# Altium footprint library header.PcbLib: 139 footprints (part 2 of 9)
Each footprint in its own frame and in the unit in brackets; x right, y up, seen from the top. Pads: shape width x height; smd on the part's side, far side on the other; paste and mask are expansions set on the pad; w line width, h text height; cw(c..) or ccw(c..) is an arc to the next point about the centre after c.
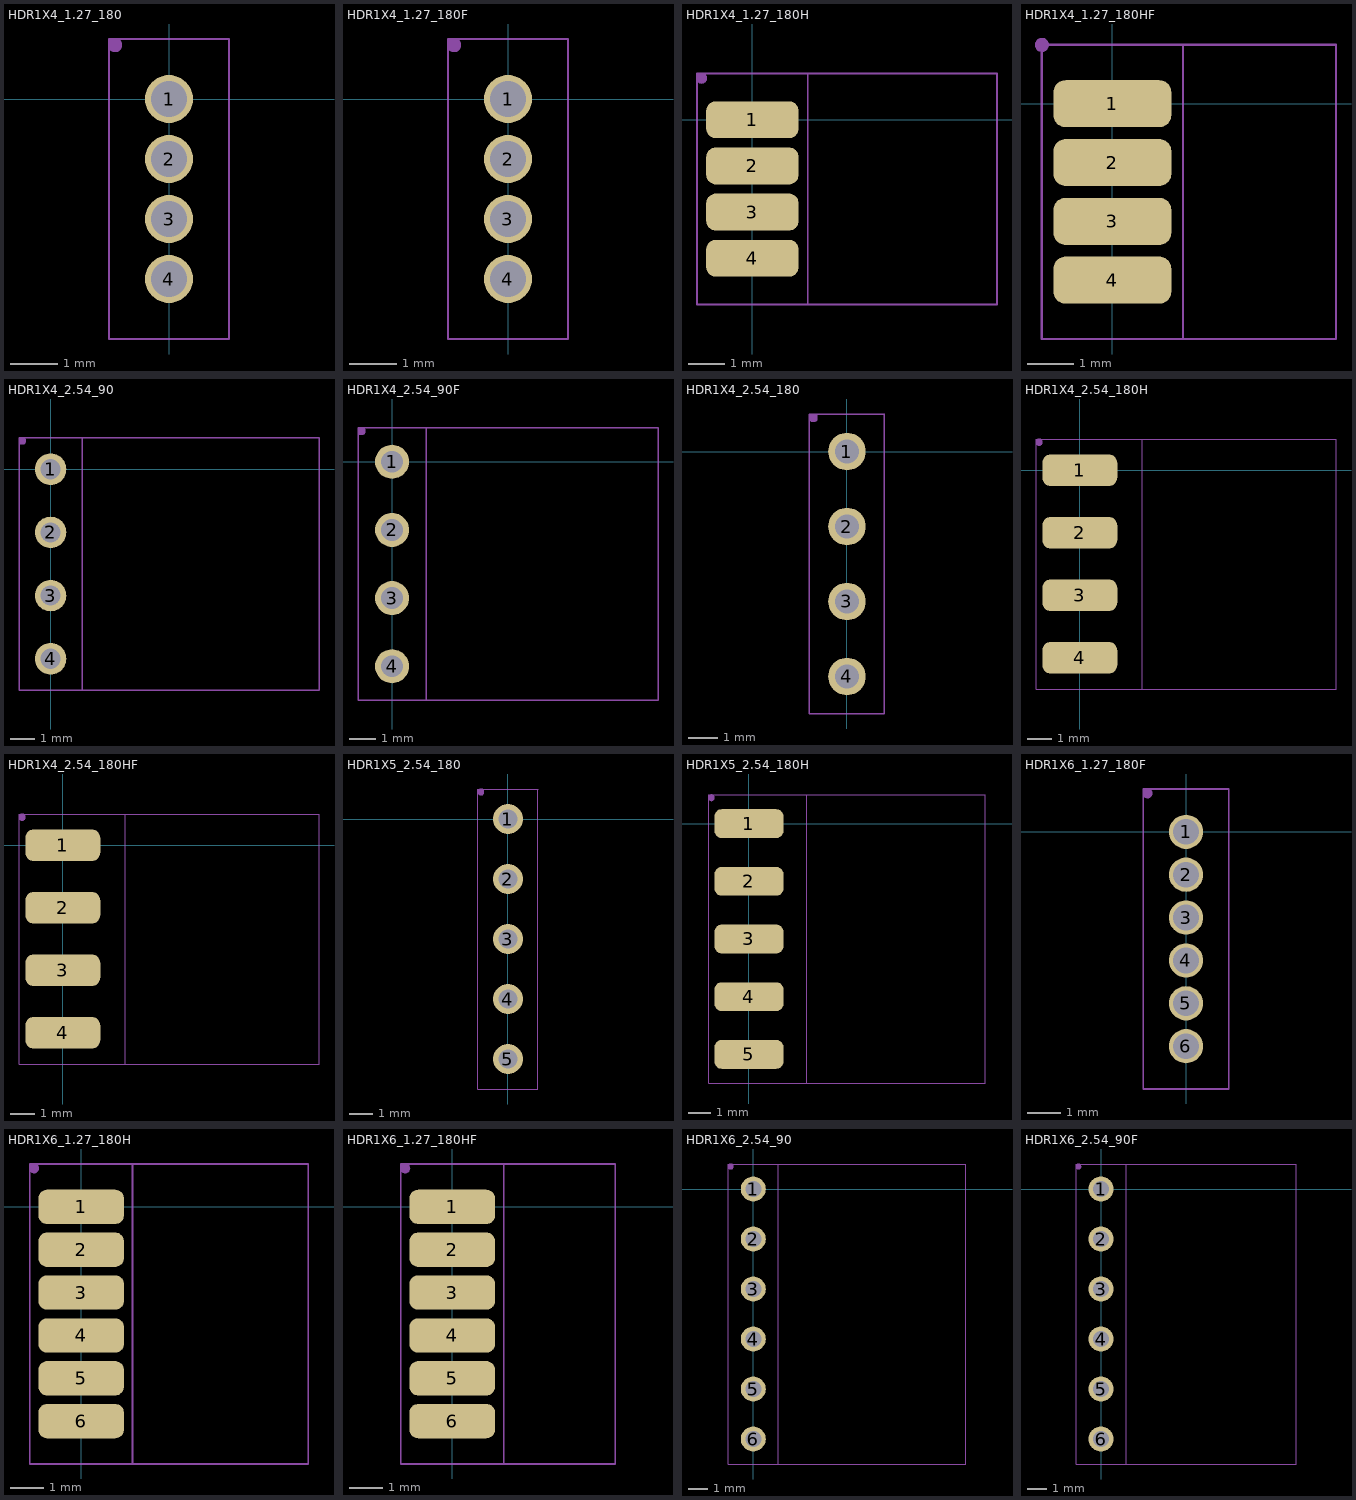
[diagram p1: the footprints below, top view; thin cyan lines are the x and y axes]

## HDR1X4_1.27_180 [mil]
height 169.29
pads (4):
  round 40 hole 30: 1(0,0) 2(0,-50) 3(0,-100) 4(0,-150)
Mechanical 13:
  lines w2: -50,-200 -50,50 50,50 50,-200 -50,-200
Top Component (Mech14):
  circle w2: c-45,45 r5
  region: -45,40 -45.99,40 -47.83,40.76 -49.24,42.17 -50,44.01 -50,45 -50,45.99 -49.24,47.83 -47.83,49.24 -45.99,50 -45,50 -44.01,50 -42.17,49.24 -40.76,47.83 -40,45.99 -40,45 -40,44.01 -40.76,42.17 -42.17,40.76 -44.01,40
  lines w2: -50,-200 -50,50 50,50 50,-200 -50,-200
  text ".Designator" at -31,-95 h80
3D body "pin_header_a-sl127-eg-g04d.stp": height 210.24, standoff -102.36, extent -49.21,-174.99 49.21,25.01

## HDR1X4_1.27_180F [mil]
height 169.29
pads (4):
  round 40 hole 30: 1(0,0) 2(0,-50) 3(0,-100) 4(0,-150)
Mechanical 13:
  lines w2: -50,-200 50,-200 50,50 -50,50 -50,-200
Top Component (Mech14):
  circle w2: c-45,45 r5
  region: -45,40 -45.99,40 -47.83,40.76 -49.24,42.17 -50,44.01 -50,45 -50,45.99 -49.24,47.83 -47.83,49.24 -45.99,50 -45,50 -44.01,50 -42.17,49.24 -40.76,47.83 -40,45.99 -40,45 -40,44.01 -40.76,42.17 -42.17,40.76 -44.01,40
  lines w2: -50,-200 50,-200 50,50 -50,50 -50,-200
  text ".Designator" at -31,-95 h80
3D body "female_header_a-bl127-eg-g04d.stp": height 133.86, standoff -94.49, extent -35.87,-182.88 35,32.88

## HDR1X4_1.27_180H [mil]
height 169.29
pads (4):
  rrect50% 100x40 smd: 1(0,0) 2(0,-50) 3(0,-100) 4(0,-150)
Mechanical 13:
  lines w2: -60,-200 -60,50 265,50 265,-200 -60,-200
Top Component (Mech14):
  circle w2: c-55,45 r5
  region: -55,40 -55.99,40 -57.83,40.76 -59.24,42.17 -60,44.01 -60,45 -60,45.99 -59.24,47.83 -57.83,49.24 -55.99,50 -55,50 -54.01,50 -52.17,49.24 -50.76,47.83 -50,45.99 -50,45 -50,44.01 -50.76,42.17 -52.17,40.76 -54.01,40
  lines w2: -60,-200 -60,50 60,50 60,-200 -60,-200
  text ".Designator" at -31,-95 h80
3D body "pin_header_a-sl127-eg-g04d.stp": height 59.21, standoff -39.21, extent -47.36,-174.99 265.24,25.01

## HDR1X4_1.27_180HF [mil]
height 169.29
pads (4):
  rrect50% 100x40 smd: 1(0,0) 2(0,-50) 3(0,-100) 4(0,-150)
Mechanical 13:
  lines w2: -60,-200 190,-200 190,50 -60,50 -60,-200
Top Component (Mech14):
  circle w2: c-60,50 r5
  region: -60,45 -60.99,45 -62.83,45.76 -64.24,47.17 -65,49.01 -65,50 -65,50.99 -64.24,52.83 -62.83,54.24 -60.99,55 -60,55 -59.01,55 -57.17,54.24 -55.76,52.83 -55,50.99 -55,50 -55,49.01 -55.76,47.17 -57.17,45.76 -59.01,45
  lines w2: -60,-200 -60,50 60,50 60,-200 -60,-200
  text ".Designator" at -31,-95 h80
3D body "female_header_a-bl127-eg-g04d.stp": height 45.43, standoff -25.43, extent -38.35,-182.88 190,32.88

## HDR1X4_2.54_90 [mil]
height 169.29
pads (4):
  round 50 hole 32: 1(0,0) 2(0,-100) 3(0,-200) 4(0,-300)
Mechanical 13:
  lines w2: -50,-350 -50,50 425,50 425,-350 -50,-350
Top Component (Mech14):
  circle w2: c-45,45 r5
  region: -45,40 -45.99,40 -47.83,40.76 -49.24,42.17 -50,44.01 -50,45 -50,45.99 -49.24,47.83 -47.83,49.24 -45.99,50 -45,50 -44.01,50 -42.17,49.24 -40.76,47.83 -40,45.99 -40,45 -40,44.01 -40.76,42.17 -42.17,40.76 -44.01,40
  lines w2: -50,-350 50,-350 50,50 -50,50 -50,-350
  text ".Designator" at -31,-170 h80
3D body "pin_header_aw140-ea-g04g.stp": height 99.21, standoff -93.7, extent -14.96,-346.06 423.62,46.07

## HDR1X4_2.54_90F [mil]
height 169.29
pads (4):
  round 50 hole 32: 1(0,0) 2(0,-100) 3(0,-200) 4(0,-300)
Mechanical 13:
  lines w2: -50,-350 390,-350 390,50 -50,50 -50,-350
Top Component (Mech14):
  circle w2: c-45,45 r5
  region: -45,40 -45.99,40 -47.83,40.76 -49.24,42.17 -50,44.01 -50,45 -50,45.99 -49.24,47.83 -47.83,49.24 -45.99,50 -45,50 -44.01,50 -42.17,49.24 -40.76,47.83 -40,45.99 -40,45 -40,44.01 -40.76,42.17 -42.17,40.76 -44.01,40
  lines w2: -50,-350 -50,50 50,50 50,-350 -50,-350
  text ".Designator" at -31,-170 h80
3D body "female_header_a-bl254-ea-g04d.stp": height 99.21, standoff -125.2, extent -10,-354.92 386.06,54.92

## HDR1X4_2.54_180 [mil]
height 169.29
pads (4):
  round 50 hole 32: 1(0,0) 2(0,-100) 3(0,-200) 4(0,-300)
Mechanical 13:
  lines w2: -50,-350 50,-350 50,50 -50,50 -50,-350
Top Component (Mech14):
  circle w2: c-45,45 r5
  region: -45,40 -45.99,40 -47.83,40.76 -49.24,42.17 -50,44.01 -50,45 -50,45.99 -49.24,47.83 -47.83,49.24 -45.99,50 -45,50 -44.01,50 -42.17,49.24 -40.76,47.83 -40,45.99 -40,45 -40,44.01 -40.76,42.17 -42.17,40.76 -44.01,40
  lines w2: -50,-350 50,-350 50,50 -50,50 -50,-350
  text ".Designator" at -31,-170 h80
3D body "pin_header_aw140-eg-g04d.stp": height 322.83, standoff -118.11, extent -49.18,-350 49.18,50

## HDR1X4_2.54_180H [mil]
height 169.29
pads (4):
  rrect50% 120x50 smd: 1(0,0) 2(0,-100) 3(0,-200) 4(0,-300)
Mechanical 13:
  lines w2: -70,-350 -70,50 410,50 410,-350 -70,-350
Top Component (Mech14):
  circle w2: c-65,45 r5
  region: -65,40 -65.99,40 -67.83,40.76 -69.24,42.17 -70,44.01 -70,45 -70,45.99 -69.24,47.83 -67.83,49.24 -65.99,50 -65,50 -64.01,50 -62.17,49.24 -60.76,47.83 -60,45.99 -60,45 -60,44.01 -60.76,42.17 -62.17,40.76 -64.01,40
  lines w2: -70,-350 100,-350 100,50 -70,50 -70,-350
  text ".Designator" at -31,-170 h80
3D body "pin_header_aw140-eg-g04d.stp": height 61.32, standoff -37.05, extent -35,-350 405.94,50

## HDR1X4_2.54_180HF [mil]
height 169.29
pads (4):
  rrect50% 120x50 smd: 1(0,0) 2(0,-100) 3(0,-200) 4(0,-300)
Mechanical 13:
  lines w2: -70,-350 410,-350 410,50 -70,50 -70,-350
Top Component (Mech14):
  circle w2: c-65,45 r5
  region: -65,40 -65.99,40 -67.83,40.76 -69.24,42.17 -70,44.01 -70,45 -70,45.99 -69.24,47.83 -67.83,49.24 -65.99,50 -65,50 -64.01,50 -62.17,49.24 -60.76,47.83 -60,45.99 -60,45 -60,44.01 -60.76,42.17 -62.17,40.76 -64.01,40
  lines w2: -70,-350 -70,50 100,50 100,-350 -70,-350
  text ".Designator" at -31,-170 h80

## HDR1X5_2.54_180 [mil]
height 169.29
pads (5):
  round 50 hole 32: 1(0,0) 2(0,-100) 3(0,-200) 4(0,-300) 5(0,-400)
Mechanical 13:
  lines w2: -50,-450 -50,50 50,50 50,-450 -50,-450
Top Component (Mech14):
  circle w2: c-45,45 r5
  region: -45,40 -45.99,40 -47.83,40.76 -49.24,42.17 -50,44.01 -50,45 -50,45.99 -49.24,47.83 -47.83,49.24 -45.99,50 -45,50 -44.01,50 -42.17,49.24 -40.76,47.83 -40,45.99 -40,45 -40,44.01 -40.76,42.17 -42.17,40.76 -44.01,40
  lines w2: -50,-450 50,-450 50,50 -50,50 -50,-450
  text ".Designator" at -31,-220 h80
3D body "pin_header_aw140-eg-g05d.stp": height 322.83, standoff -118.11, extent -49.18,-450 49.18,50

## HDR1X5_2.54_180H [mil]
height 169.29
pads (5):
  rrect50% 120x50 smd: 1(0,0) 2(0,-100) 3(0,-200) 4(0,-300) 5(0,-400)
Mechanical 13:
  lines w2: -70,-450 -70,50 410,50 410,-450 -70,-450
Top Component (Mech14):
  circle w2: c-65,45 r5
  region: -65,40 -65.99,40 -67.83,40.76 -69.24,42.17 -70,44.01 -70,45 -70,45.99 -69.24,47.83 -67.83,49.24 -65.99,50 -65,50 -64.01,50 -62.17,49.24 -60.76,47.83 -60,45.99 -60,45 -60,44.01 -60.76,42.17 -62.17,40.76 -64.01,40
  lines w2: -70,-450 100,-450 100,50 -70,50 -70,-450
  text ".Designator" at -31,-220 h80
3D body "pin_header_aw140-eg-g05d.stp": height 61.32, standoff -37.05, extent -35,-450 405.95,50

## HDR1X6_1.27_180F [mil]
height 169.29
pads (6):
  round 40 hole 30: 1(0,0) 2(0,-50) 3(0,-100) 4(0,-150) 5(0,-200) 6(0,-250)
Mechanical 13:
  lines w2: -50,-300 50,-300 50,50 -50,50 -50,-300
Top Component (Mech14):
  circle w2: c-45,45 r5
  region: -45,40 -45.99,40 -47.83,40.76 -49.24,42.17 -50,44.01 -50,45 -50,45.99 -49.24,47.83 -47.83,49.24 -45.99,50 -45,50 -44.01,50 -42.17,49.24 -40.76,47.83 -40,45.99 -40,45 -40,44.01 -40.76,42.17 -42.17,40.76 -44.01,40
  lines w2: -50,-300 50,-300 50,50 -50,50 -50,-300
  text ".Designator" at -31,-145 h80

## HDR1X6_1.27_180H [mil]
height 169.29
pads (6):
  rrect50% 100x40 smd: 1(0,0) 2(0,-50) 3(0,-100) 4(0,-150) 5(0,-200) 6(0,-250)
Mechanical 13:
  lines w2: -60,-300 -60,50 265,50 265,-300 -60,-300
Top Component (Mech14):
  circle w2: c-55,45 r5
  region: -55,40 -55.99,40 -57.83,40.76 -59.24,42.17 -60,44.01 -60,45 -60,45.99 -59.24,47.83 -57.83,49.24 -55.99,50 -55,50 -54.01,50 -52.17,49.24 -50.76,47.83 -50,45.99 -50,45 -50,44.01 -50.76,42.17 -52.17,40.76 -54.01,40
  lines w2: -60,-300 60,-300 60,50 -60,50 -60,-300
  text ".Designator" at -31,-145 h80
3D body "pin_header_a-sl127-eg-g06d.stp": height 49.21, standoff -49.21, extent -47.36,-274.99 265.24,25.01

## HDR1X6_1.27_180HF [mil]
height 169.29
pads (6):
  rrect50% 100x40 smd: 1(0,0) 2(0,-50) 3(0,-100) 4(0,-150) 5(0,-200) 6(0,-250)
Mechanical 13:
  lines w2: -60,-300 190,-300 190,50 -60,50 -60,-300
Top Component (Mech14):
  circle w2: c-55,45 r5
  region: -55,40 -55.99,40 -57.83,40.76 -59.24,42.17 -60,44.01 -60,45 -60,45.99 -59.24,47.83 -57.83,49.24 -55.99,50 -55,50 -54.01,50 -52.17,49.24 -50.76,47.83 -50,45.99 -50,45 -50,44.01 -50.76,42.17 -52.17,40.76 -54.01,40
  lines w2: -60,-300 -60,50 60,50 60,-300 -60,-300
  text ".Designator" at -31,-145 h80
3D body "female_header_a-bl127-eg-g06d.stp": height 71.43, standoff 0.57, extent -38.35,-282.88 190,32.88

## HDR1X6_2.54_90 [mil]
height 169.29
pads (6):
  round 50 hole 32: 1(0,0) 2(0,-100) 3(0,-200) 4(0,-300) 5(0,-400) 6(0,-500)
Mechanical 13:
  lines w2: -50,-550 425,-550 425,50 -50,50 -50,-550
Top Component (Mech14):
  circle w2: c-45,45 r5
  region: -45,40 -45.99,40 -47.83,40.76 -49.24,42.17 -50,44.01 -50,45 -50,45.99 -49.24,47.83 -47.83,49.24 -45.99,50 -45,50 -44.01,50 -42.17,49.24 -40.76,47.83 -40,45.99 -40,45 -40,44.01 -40.76,42.17 -42.17,40.76 -44.01,40
  lines w2: -50,-550 50,-550 50,50 -50,50 -50,-550
  text ".Designator" at -31,-270 h80
3D body "pin_header_aw140-ea-g06g.stp": height 99.21, standoff -93.7, extent -14.96,-546.06 423.62,46.07

## HDR1X6_2.54_90F [mil]
height 169.29
pads (6):
  round 50 hole 32: 1(0,0) 2(0,-100) 3(0,-200) 4(0,-300) 5(0,-400) 6(0,-500)
Mechanical 13:
  lines w2: -50,-550 390,-550 390,50 -50,50 -50,-550
Top Component (Mech14):
  circle w2: c-45,45 r5
  region: -45,40 -45.99,40 -47.83,40.76 -49.24,42.17 -50,44.01 -50,45 -50,45.99 -49.24,47.83 -47.83,49.24 -45.99,50 -45,50 -44.01,50 -42.17,49.24 -40.76,47.83 -40,45.99 -40,45 -40,44.01 -40.76,42.17 -42.17,40.76 -44.01,40
  lines w2: -50,-550 -50,50 50,50 50,-550 -50,-550
  text ".Designator" at -31,-270 h80
3D body "female_header_a-bl254-ea-g06d.stp": height 99.21, standoff -125.2, extent -10,-554.92 386.06,54.92